# Altium schematic symbol library IoT_Uni_Term_SchLib.SchLib: 11 symbols
Pins are listed as number, name and electrical type; pins without a type are passive.

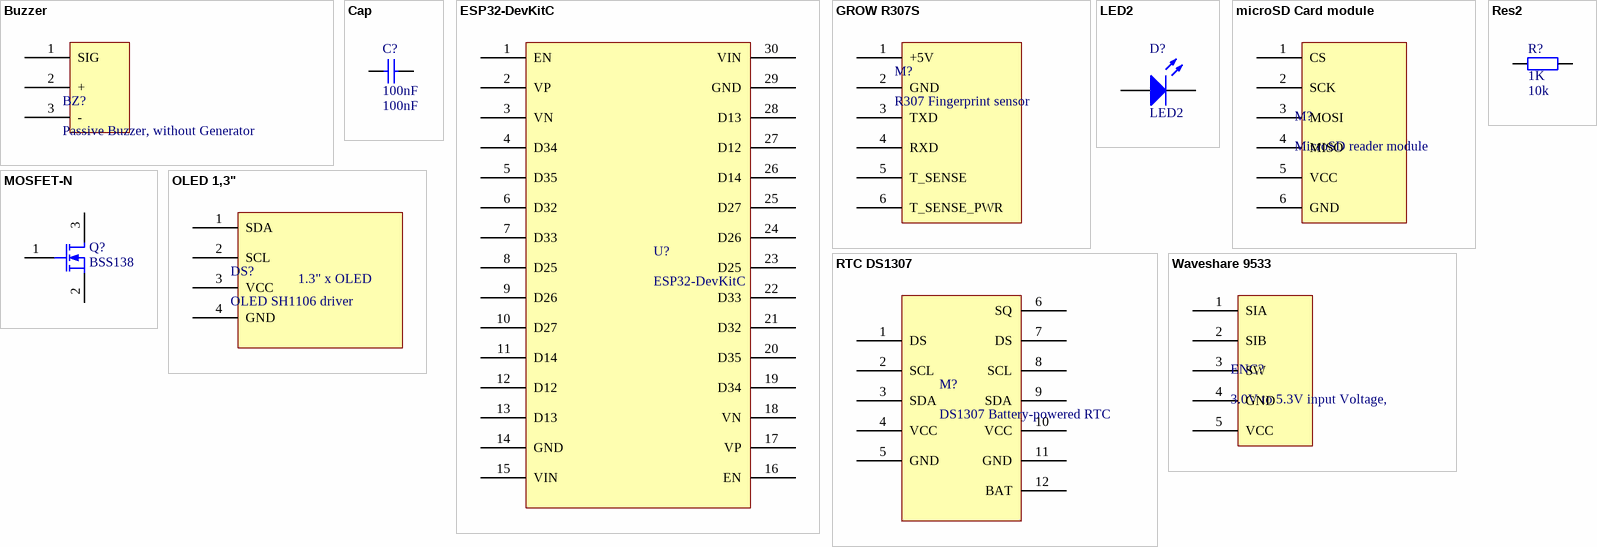
[diagram p0: symbols Buzzer to Waveshare 9533]

## Buzzer
designator BZ?, comment Passive Buzzer, without Generator
positive, negative terminals + input signal
footprint MOJE_ZLACZE_3PIN
pins: 1 SIG, 2 +, 3 -

## Cap
designator C?, comment 100nF
Capacitor; Published: 8-Jun-2000; LatestRevisionDate: 17-Jul-2002; LatestRevisionNote: Re-released for DXP Platform.; PackageReference: RAD-0.3; Publisher: Altium Limited; PackageDescription: Radial Cap, Thru-Hole; 2 Leads; 0.3 in Pin Spacing; Value: 100nF
simulation model CAP (Capacitor)
signal-integrity model Cap
footprint Capacitor_FP-C1206C-EB-IPC_B
pins: 1, 1

## ESP32-DevKitC
designator U?
ESP32-based development board produced by Espressif
footprint ESP32_DevKitC_WROOM-32_15x2PIN
pins: 1 EN, 2 VP, 3 VN, 4 D34, 5 D35, 6 D32, 7 D33, 8 D25, 9 D26, 10 D27, 11 D14, 12 D12, 13 D13, 14 GND, 15 VIN, 16 EN, 17 VP, 18 VN, 19 D34, 20 D35, 21 D32, 22 D33, 23 D25, 24 D26, 25 D27, 26 D14, 27 D12, 28 D13, 29 GND, 30 VIN

## GROW R307S
designator M?, comment R307 Fingerprint sensor
optical fingerprint sensor module from Hangzhou Grow Technology Co., Ltd. It features a high-speed DSP processor, flash memory for storage
footprint MOJE_ZLACZE_6PIN
pins: 1 +5V, 2 GND, 3 TXD, 4 RXD, 5 T_SENSE, 6 T_SENSE_PWR

## LED2
designator D?
Typical RED, GREEN, YELLOW, AMBER GaAs LED; Published: 8-Jun-2000; LatestRevisionDate: 17-Jul-2002; LatestRevisionNote: Re-released for DXP Platform.; PackageVersion: Feb-2002; PackageReference: 3.2X1.6X1.1; Publisher: Altium Limited; PackageDescription: SM LED; 2 Flat Leads
simulation model LED2 (Diode)
footprint MOJE_ZLACZE_2PIN
pins: 1 A, 2 K

## microSD Card module
designator M?, comment MicroSD reader module
SPI INTERFACE, 2.54mm, 3.3V - 5.0V
footprint MOJE_ZLACZE_6PIN
pins: 1 CS, 2 SCK, 3 MOSI, 4 MISO, 5 VCC, 6 GND

## MOSFET-N
designator Q?, comment BSS138
N-Channel MOSFET; Published: 8-Jun-2000; LatestRevisionDate: 17-Jul-2002; LatestRevisionNote: Re-released for DXP Platform.; PackageVersion: 1995/1996; PackageReference: E3; Publisher: Altium Limited; PackageDescription: TO, Flat Index; 3 In-Line, Axial Leads; Body Dia. 4.6mm; Lead Dia. 0.5 mm (max)
simulation model NMOS (MOSFET-N)
footprint BSS138
pins: 1 G, 2 S, 3 D

## OLED 1,3"
designator DS?, comment OLED SH1106 driver
Blue 1.3" graphics OLED display 128x64px I2C v2 - Blue Font
footprint MOJE_ZLACZE_4PIN
pins: 1 SDA, 2 SCL, 3 VCC, 4 GND
text: 1.3" x OLED

## Res2
designator R?, comment 10k  value 1K
Resistor; Published: 8-Jun-2000; LatestRevisionDate: 17-Jul-2002; LatestRevisionNote: Re-released for DXP Platform.; PackageReference: AXIAL-0.4; Publisher: Altium Limited; PackageDescription: Axial Device, Thru-Hole; 2 Leads; 0.4 in Pin Spacing
simulation model RESISTOR (Resistor)
signal-integrity model Res
footprint RESISTOR 1206
pins: 1, 2

## RTC DS1307
designator M?, comment DS1307 Battery-powered RTC
RTC CR2032 BATTERY POWERED, REAL TIME CLOCK. I2C + 32kB EEPROM
footprint RTC_DS1307
pins: 1 DS, 2 SCL, 3 SDA, 4 VCC, 5 GND, 6 SQ, 7 DS, 8 SCL, 9 SDA, 10 VCC, 11 GND, 12 BAT

## Waveshare 9533
designator ENC?, comment 3.0V to 5.3V input Voltage,
compact rotary encoder module featuring a built-in button, designed to detect clockwise and anti-clockwise rotation for menu navigation, volume control, or motor positioning
footprint MOJE_ZLACZE_5PIN
pins: 1 SIA, 2 SIB, 3 SW, 4 GND, 5 VCC